# Altium footprint library FootPrintLib_3.PcbLib: 198 footprints (part 5 of 13)
Each footprint in its own frame and in the unit in brackets; x right, y up, seen from the top. Pads: shape width x height; smd on the part's side, far side on the other; paste and mask are expansions set on the pad; w line width, h text height; cw(c..) or ccw(c..) is an arc to the next point about the centre after c.
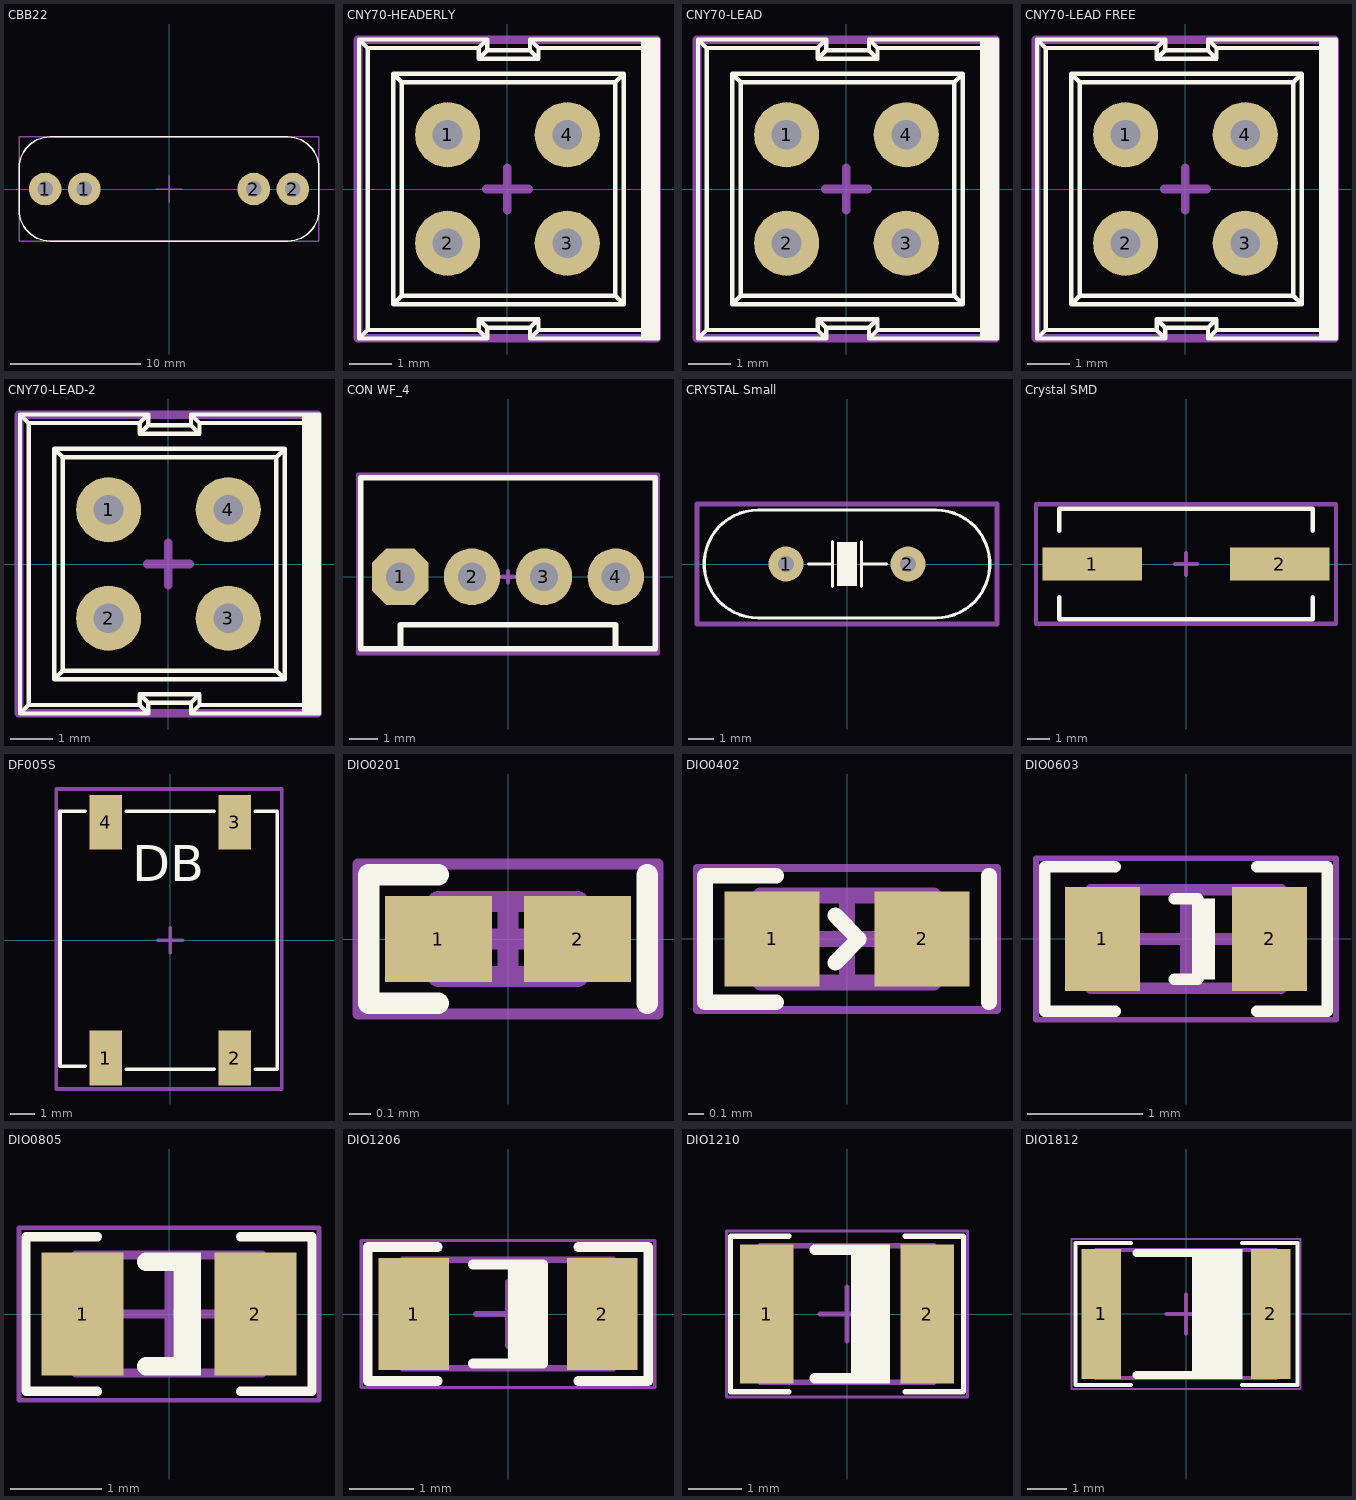
[diagram p4: the footprints below, top view; thin cyan lines are the x and y axes]

## CBB22 [mm] "Buddy: 23'mm, Pin: 19'mm, 16'mm, 13'mm,"
height 13
pads (4):
  round 2.5 hole 1.2: 1(-9.5,0) 1(-6.5,0) 2(6.5,0) 2(9.5,0)
Top Overlay:
  lines w0.1: -11.5,-1.587 ccw(c-9.087,-1.587) -9.087,-4 9.087,-4 ccw(c9.087,-1.587) 11.5,-1.587 11.5,0 11.5,1.587 ccw(c9.087,1.587) 9.087,4 0,4 -9.087,4 ccw(c-9.087,1.587) -11.5,1.587 -11.5,0 -11.5,-1.587
Mechanical 15:
  lines w0.1: -1,0 1,0 ; 0,-1 0,1 ; -11.5,-4 11.5,-4 11.5,4 -11.5,4 -11.5,-4
3D body "User Library-CBB81_W23_0_H14_5_T8_0_P19_0.STEP": height 19.5, standoff -8, extent -11.499,-4 11.5,4

## CNY70-HEADERLY [mm] "Dimensions (L x W x H in mm): 7 x 7 x 6  • Peak operating distance: < 0.5 mm DESIGNER ABBAS BASEREH"
height 6
pads (4):
  round 1.524 hole 0.7: 1(-1.4,1.27) 2(-1.4,-1.27) 3(1.4,-1.27) 4(1.4,1.27)
Top Overlay:
  rectangle: 3.125,-3.5 3.525,3.5
  lines w0.1: -3.475,-3.5 -0.475,-3.5 ; -3.475,-3.5 -3.275,-3.3 ; -3.475,-3.5 -3.475,3.5 ; -3.475,3.5 -3.275,3.3 ; -3.475,3.5 -0.475,3.5 ; -3.275,-3.3 -0.675,-3.3 ; -3.275,-3.3 -3.275,3.3 ; -3.275,3.3 -0.675,3.3 ; -2.675,-2.7 -2.475,-2.5 ; -2.675,-2.7 -2.675,2.7 ; -2.675,-2.7 2.725,-2.7 ; -2.675,2.7 -2.475,2.5 ; -2.675,2.7 2.725,2.7 ; -2.475,-2.5 -2.475,2.5 ; -2.475,-2.5 2.525,-2.5 ; -2.475,2.5 2.525,2.5 ; -0.675,-3.3 -0.675,-3.05 ; -0.675,-3.3 -0.475,-3.5 ; -0.675,-3.05 0.725,-3.05 ; -0.675,-3.05 -0.475,-3.25 ; -0.675,3.05 0.725,3.05 ; -0.675,3.05 -0.675,3.3 ; -0.675,3.05 -0.475,3.25 ; -0.675,3.3 -0.475,3.5 ; -0.475,-3.5 -0.475,-3.25 ; -0.475,-3.25 0.525,-3.25 ; -0.475,3.25 0.525,3.25 ; -0.475,3.25 -0.475,3.5 ; 0.525,-3.5 3.525,-3.5 ; 0.525,-3.5 0.725,-3.3 ; 0.525,-3.5 0.525,-3.25 ; 0.525,-3.25 0.725,-3.05 ; 0.525,3.25 0.725,3.05 ; 0.525,3.25 0.525,3.5 ; 0.525,3.5 0.725,3.3 ; 0.525,3.5 3.525,3.5 ; 0.725,-3.3 3.325,-3.3 ; 0.725,-3.3 0.725,-3.05 ; 0.725,3.05 0.725,3.3 ; 0.725,3.3 3.325,3.3 ; 2.525,-2.5 2.725,-2.7 ; 2.525,-2.5 2.525,2.5 ; 2.525,2.5 2.725,2.7 ; 2.725,-2.7 2.725,2.7 ; 3.325,-3.3 3.525,-3.5 ; 3.325,-3.3 3.325,3.3 ; 3.325,3.3 3.525,3.5 ; 3.525,-3.5 3.525,3.5
Mechanical 15:
  lines w0.2: -0.5,0 0.5,0 ; 0,-0.5 0,0.5 ; -3.5,-3.5 -3.5,3.5 3.5,3.5 3.5,-3.5 -3.5,-3.5
3D body "User Library-cny70-2.STEP": height 11.5, standoff -2.5, extent -3.55,-3.5 3.45,3.5

## CNY70-LEAD [mm] "Dimensions (L x W x H in mm): 7 x 7 x 6  • Peak operating distance: < 0.5 mm DESIGNER ABBAS BASEREH"
height 6
pads (4):
  round 1.524 hole 0.7: 1(-1.4,1.27) 2(-1.4,-1.27) 3(1.4,-1.27) 4(1.4,1.27)
Top Overlay:
  rectangle: 3.125,-3.5 3.525,3.5
  lines w0.1: -3.475,-3.5 -3.475,3.5 ; -3.475,-3.5 -3.275,-3.3 ; -3.475,-3.5 -0.475,-3.5 ; -3.475,3.5 -0.475,3.5 ; -3.475,3.5 -3.275,3.3 ; -3.275,-3.3 -3.275,3.3 ; -3.275,-3.3 -0.675,-3.3 ; -3.275,3.3 -0.675,3.3 ; -2.675,-2.7 2.725,-2.7 ; -2.675,-2.7 -2.675,2.7 ; -2.675,-2.7 -2.475,-2.5 ; -2.675,2.7 2.725,2.7 ; -2.675,2.7 -2.475,2.5 ; -2.475,-2.5 2.525,-2.5 ; -2.475,-2.5 -2.475,2.5 ; -2.475,2.5 2.525,2.5 ; -0.675,-3.3 -0.475,-3.5 ; -0.675,-3.3 -0.675,-3.05 ; -0.675,-3.05 -0.475,-3.25 ; -0.675,-3.05 0.725,-3.05 ; -0.675,3.05 -0.475,3.25 ; -0.675,3.05 -0.675,3.3 ; -0.675,3.05 0.725,3.05 ; -0.675,3.3 -0.475,3.5 ; -0.475,-3.5 -0.475,-3.25 ; -0.475,-3.25 0.525,-3.25 ; -0.475,3.25 -0.475,3.5 ; -0.475,3.25 0.525,3.25 ; 0.525,-3.5 0.525,-3.25 ; 0.525,-3.5 0.725,-3.3 ; 0.525,-3.5 3.525,-3.5 ; 0.525,-3.25 0.725,-3.05 ; 0.525,3.25 0.525,3.5 ; 0.525,3.25 0.725,3.05 ; 0.525,3.5 3.525,3.5 ; 0.525,3.5 0.725,3.3 ; 0.725,-3.3 0.725,-3.05 ; 0.725,-3.3 3.325,-3.3 ; 0.725,3.05 0.725,3.3 ; 0.725,3.3 3.325,3.3 ; 2.525,-2.5 2.525,2.5 ; 2.525,-2.5 2.725,-2.7 ; 2.525,2.5 2.725,2.7 ; 2.725,-2.7 2.725,2.7 ; 3.325,-3.3 3.325,3.3 ; 3.325,-3.3 3.525,-3.5 ; 3.325,3.3 3.525,3.5 ; 3.525,-3.5 3.525,3.5
Mechanical 15:
  lines w0.2: -0.5,0 0.5,0 ; 0,-0.5 0,0.5 ; -3.5,-3.5 3.5,-3.5 3.5,3.5 -3.5,3.5 -3.5,-3.5
3D body "SW3dPS-cny70-1.STEP": height 6.5, standoff -5.25, extent -3.5,-3.5 3.5,3.5

## CNY70-LEAD FREE [mm] "Dimensions (L x W x H in mm): 7 x 7 x 6  • Peak operating distance: < 0.5 mm DESIGNER ABBAS BASEREH"
height 6
pads (4):
  round 1.524 hole 0.7: 1(-1.4,1.27) 2(-1.4,-1.27) 3(1.4,-1.27) 4(1.4,1.27)
Top Overlay:
  rectangle: 3.125,-3.5 3.525,3.5
  lines w0.1: -3.475,-3.5 -3.475,3.5 ; -3.475,-3.5 -3.275,-3.3 ; -3.475,-3.5 -0.475,-3.5 ; -3.475,3.5 -0.475,3.5 ; -3.475,3.5 -3.275,3.3 ; -3.275,-3.3 -3.275,3.3 ; -3.275,-3.3 -0.675,-3.3 ; -3.275,3.3 -0.675,3.3 ; -2.675,-2.7 2.725,-2.7 ; -2.675,-2.7 -2.675,2.7 ; -2.675,-2.7 -2.475,-2.5 ; -2.675,2.7 2.725,2.7 ; -2.675,2.7 -2.475,2.5 ; -2.475,-2.5 2.525,-2.5 ; -2.475,-2.5 -2.475,2.5 ; -2.475,2.5 2.525,2.5 ; -0.675,-3.3 -0.475,-3.5 ; -0.675,-3.3 -0.675,-3.05 ; -0.675,-3.05 -0.475,-3.25 ; -0.675,-3.05 0.725,-3.05 ; -0.675,3.05 -0.475,3.25 ; -0.675,3.05 -0.675,3.3 ; -0.675,3.05 0.725,3.05 ; -0.675,3.3 -0.475,3.5 ; -0.475,-3.5 -0.475,-3.25 ; -0.475,-3.25 0.525,-3.25 ; -0.475,3.25 -0.475,3.5 ; -0.475,3.25 0.525,3.25 ; 0.525,-3.5 0.525,-3.25 ; 0.525,-3.5 0.725,-3.3 ; 0.525,-3.5 3.525,-3.5 ; 0.525,-3.25 0.725,-3.05 ; 0.525,3.25 0.525,3.5 ; 0.525,3.25 0.725,3.05 ; 0.525,3.5 3.525,3.5 ; 0.525,3.5 0.725,3.3 ; 0.725,-3.3 0.725,-3.05 ; 0.725,-3.3 3.325,-3.3 ; 0.725,3.05 0.725,3.3 ; 0.725,3.3 3.325,3.3 ; 2.525,-2.5 2.525,2.5 ; 2.525,-2.5 2.725,-2.7 ; 2.525,2.5 2.725,2.7 ; 2.725,-2.7 2.725,2.7 ; 3.325,-3.3 3.325,3.3 ; 3.325,-3.3 3.525,-3.5 ; 3.325,3.3 3.525,3.5 ; 3.525,-3.5 3.525,3.5
Mechanical 15:
  lines w0.2: -0.5,0 0.5,0 ; 0,-0.5 0,0.5 ; -3.5,-3.5 3.5,-3.5 3.5,3.5 -3.5,3.5 -3.5,-3.5
3D body "CNY70.STEP": height 6.01, standoff 0.01, extent -3.475,-3.5 3.525,3.5

## CNY70-LEAD-2 [mm] "Dimensions (L x W x H in mm): 7 x 7 x 6  • Peak operating distance: < 0.5 mm DESIGNER ABBAS BASEREH"
height 6
pads (4):
  round 1.524 hole 0.7: 1(-1.4,1.27) 2(-1.4,-1.27) 3(1.4,-1.27) 4(1.4,1.27)
Top Overlay:
  rectangle: 3.125,-3.5 3.525,3.5
  lines w0.1: -3.475,-3.5 -3.475,3.5 ; -3.475,-3.5 -3.275,-3.3 ; -3.475,-3.5 -0.475,-3.5 ; -3.475,3.5 -0.475,3.5 ; -3.475,3.5 -3.275,3.3 ; -3.275,-3.3 -3.275,3.3 ; -3.275,-3.3 -0.675,-3.3 ; -3.275,3.3 -0.675,3.3 ; -2.675,-2.7 2.725,-2.7 ; -2.675,-2.7 -2.675,2.7 ; -2.675,-2.7 -2.475,-2.5 ; -2.675,2.7 2.725,2.7 ; -2.675,2.7 -2.475,2.5 ; -2.475,-2.5 2.525,-2.5 ; -2.475,-2.5 -2.475,2.5 ; -2.475,2.5 2.525,2.5 ; -0.675,-3.3 -0.475,-3.5 ; -0.675,-3.3 -0.675,-3.05 ; -0.675,-3.05 -0.475,-3.25 ; -0.675,-3.05 0.725,-3.05 ; -0.675,3.05 -0.475,3.25 ; -0.675,3.05 -0.675,3.3 ; -0.675,3.05 0.725,3.05 ; -0.675,3.3 -0.475,3.5 ; -0.475,-3.5 -0.475,-3.25 ; -0.475,-3.25 0.525,-3.25 ; -0.475,3.25 -0.475,3.5 ; -0.475,3.25 0.525,3.25 ; 0.525,-3.5 0.525,-3.25 ; 0.525,-3.5 0.725,-3.3 ; 0.525,-3.5 3.525,-3.5 ; 0.525,-3.25 0.725,-3.05 ; 0.525,3.25 0.525,3.5 ; 0.525,3.25 0.725,3.05 ; 0.525,3.5 3.525,3.5 ; 0.525,3.5 0.725,3.3 ; 0.725,-3.3 0.725,-3.05 ; 0.725,-3.3 3.325,-3.3 ; 0.725,3.05 0.725,3.3 ; 0.725,3.3 3.325,3.3 ; 2.525,-2.5 2.525,2.5 ; 2.525,-2.5 2.725,-2.7 ; 2.525,2.5 2.725,2.7 ; 2.725,-2.7 2.725,2.7 ; 3.325,-3.3 3.325,3.3 ; 3.325,-3.3 3.525,-3.5 ; 3.325,3.3 3.525,3.5 ; 3.525,-3.5 3.525,3.5
Mechanical 15:
  lines w0.2: -0.5,0 0.5,0 ; 0,-0.5 0,0.5 ; -3.5,-3.5 3.5,-3.5 3.5,3.5 -3.5,3.5 -3.5,-3.5
3D body "CNY70.SLDPRT": height 6, standoff -6.75, extent -3.15,-3.15 3.15,3.15

## CON WF_4 [mm] "DS1070  WF, Cvilux CI31 pitch 2.54mm-Designer Abbas Basereh"
pads (4):
  oct 2x2 hole 1: 1(-3.81,0)
  round 2 hole 1: 2(-1.27,0) 3(1.27,0) 4(3.81,0)
Top Overlay:
  lines w0.2: -3.8,-2.548 -3.8,-1.7 3.8,-1.7 3.8,-2.548 ; -5.2,-2.548 5.2,-2.548 5.2,3.5 -5.2,3.5 -5.2,-2.548
Mechanical 15:
  lines w0.15: -0.2,0 0.2,0 ; 0,-0.2 0,0.2 ; -5.3,-2.7 5.3,-2.7 5.3,3.6 -5.3,3.6 -5.3,-2.7
3D body "User Library-CI31_4.step": height 11.56, standoff -3.24, extent -5.08,-2.402 5.08,3.398

## CRYSTAL Small [mil] "DESIGNER ABBAS BASEREH"
height 157.48
pads (2):
  round 55 hole 25: 1(-96.06,0) 2(96.06,0)
Top Overlay:
  rectangle: -15.75,-35 15.75,35
  lines w5: -60.87,0 -22.87,0 ; -22.87,-35 -22.87,35 ; 22.87,-35 22.87,35 ; 22.87,0 61.87,0 ; -140,-85 cw(c-140,0) -140,85 140,85 cw(c140,0) 140,-85 -140,-85
Mechanical 15:
  lines w7.87: -7.87,0 7.87,0 ; 0,-7.87 0,7.87 ; -236.22,-94.49 236.22,-94.49 236.22,94.49 -236.22,94.49 -236.22,-94.49
3D body "Crystal-3.8mm.STEP": height 142.13, standoff -76.77, extent -226.37,-88.58 226.38,88.59

## Crystal SMD [mm] "DESIGNER ABBAS BASEREH"
height 4
pads (2):
  rect 4.5x1.5 smd: 1(-4.25,0) 2(4.25,0)
Top Overlay:
  lines w0.2: -5.75,-1.5 -5.75,-2.5 5.75,-2.5 5.75,-1.5 ; -5.75,1.5 -5.75,2.5 5.75,2.5 5.75,1.5
Mechanical 15:
  lines w0.2: -0.5,0 0.5,0 ; 0,-0.5 0,0.5 ; -6.8,-2.7 -6.8,2.7 6.8,2.7 6.8,-2.7 -6.8,-2.7
3D body "User Library-HC49_SMD.STEP": height 5.18, standoff 0, extent -6.209,-2.25 6.091,2.25

## DF005S [mm] "MINIATURE GLASS PASSIVATED SINGLE-PHASE SURFACE MOUNT  BRIDGE RECTIFIER-Design:Abbas Basereh"
height 3.3
pads (4):
  rect 1.3x2.2 smd: 1(-2.6,-4.75) 2(2.6,-4.75) 3(2.6,4.75) 4(-2.6,4.75)
Top Overlay:
  lines w0.15: -3.429,-5.08 -4.445,-5.08 -4.445,5.207 -3.429,5.207 ; -1.778,-5.207 1.778,-5.207 ; -1.778,5.207 1.778,5.207 ; 3.429,-5.207 4.318,-5.207 4.318,5.207 3.429,5.207
  text "DB" at -1.524,1.905 h2.5
Mechanical 15:
  lines w0.15: -0.5,0 0.5,0 ; 0,-0.5 0,0.5 ; -4.6,-6 -4.6,6.1 4.5,6.1 4.5,-6 -4.6,-6
3D body "User Library-DFXXS.STEP": height 3.58, standoff 0.01, extent -4.315,-5.099 4.195,5.201

## DIO0201 [mm] "Chip Diode, 2-Leads, Body 0/60x0/30mm, IPC Medium Density DESIGNER:ABBAS BASEREH"
height 0.23
pads (2):
  rect 0.5x0.4 smd mask+0.04: 1(-0.325,0) 2(0.325,0)
Top Overlay:
  lines w0.1: -0.325,-0.3 -0.65,-0.3 -0.65,0.3 -0.325,0.3 ; 0.65,-0.3 0.65,0.3
Mechanical 13:
  lines w0.1: -0.325,-0.175 -0.325,0.175 0.325,0.175 0.325,-0.175 -0.325,-0.175
Mechanical 15:
  lines w0.05: -0.7,-0.35 -0.7,0.35 0.7,0.35 0.7,-0.35 -0.7,-0.35
  lines w0.1: -0.175,0 0.175,0 ; 0,-0.175 0,0.175
3D body "DIO0201.step": height 0.23, standoff 0, extent -0.325,-0.175 0.325,0.175

## DIO0402 [mm] "Chip Diode, 2-Leads, Body 1/00x0/50mm, IPC Medium Density DESIGNER:ABBAS BASEREH"
height 0.32
pads (2):
  rect 0.6x0.6 smd mask+0.06: 1(-0.475,0) 2(0.475,0)
Top Overlay:
  lines w0.1: -0.45,-0.4 -0.9,-0.4 -0.9,0.4 -0.45,0.4 ; -0.075,-0.15 0.075,0 -0.075,0.15 ; 0.9,-0.4 0.9,0.4
Mechanical 13:
  lines w0.1: -0.55,-0.275 0.55,-0.275 0.55,0.275 -0.55,0.275 -0.55,-0.275
Mechanical 15:
  lines w0.05: -0.95,-0.45 0.95,-0.45 0.95,0.45 -0.95,0.45 -0.95,-0.45
  lines w0.1: -0.275,0 0.275,0 ; 0,-0.275 0,0.275
3D body "DIO0402.step": height 0.32, standoff 0, extent -0.55,-0.275 0.55,0.275

## DIO0603 [mm] "Chip Diode, 2-Leads, Body 1/60x0/80mm, IPC Medium Density DESIGNER:ABBAS BASEREH"
height 0.4
pads (2):
  rect 0.65x0.9 smd: 1(-0.725,0) 2(0.725,0)
Top Overlay:
  rectangle: 0.05,-0.35 0.25,0.35
  lines w0.1: -0.612,-0.625 -1.225,-0.625 -1.225,0.625 -0.612,0.625 ; -0.1,-0.35 0.1,-0.35 ; -0.1,0.35 0.1,0.35 ; 0.612,-0.625 1.225,-0.625 1.225,0.625 0.612,0.625
Mechanical 13:
  lines w0.1: -0.825,-0.425 -0.825,0.425 0.825,0.425 0.825,-0.425 -0.825,-0.425
Mechanical 15:
  lines w0.05: -1.3,-0.7 -1.3,0.7 1.3,0.7 1.3,-0.7 -1.3,-0.7
  lines w0.1: -0.425,0 0.425,0 ; 0,-0.425 0,0.425
3D body "DIO0603.step": height 0.4, standoff 0, extent -0.825,-0.425 0.825,0.425

## DIO0805 [mm] "Chip Diode, 2-Leads, Body 2/00x1/25mm, IPC Medium Density DESIGNER:ABBAS BASEREH"
height 0.5
pads (2):
  rect 0.9x1.35 smd: 1(-0.95,0) 2(0.95,0)
Top Overlay:
  rectangle: 0.05,-0.675 0.35,0.675
  lines w0.1: -0.788,-0.85 -1.575,-0.85 -1.575,0.85 -0.788,0.85 ; 0.788,-0.85 1.575,-0.85 1.575,0.85 0.788,0.85
  lines w0.2: -0.25,-0.575 0.1,-0.575 ; -0.25,0.575 0.1,0.575
Mechanical 13:
  lines w0.1: -1.025,-0.65 -1.025,0.65 1.025,0.65 1.025,-0.65 -1.025,-0.65
Mechanical 15:
  lines w0.05: -1.65,-0.95 -1.65,0.95 1.65,0.95 1.65,-0.95 -1.65,-0.95
  lines w0.1: -0.5,0 0.5,0 ; 0,-0.5 0,0.5
3D body "DIO0805.step": height 0.5, standoff 0, extent -1.025,-0.65 1.025,0.65

## DIO1206 [mm] "Chip Diode, 2-Leads, Body 3/20x1/60mm, IPC Medium Density DESIGNER:ABBAS BASEREH"
height 0.94
pads (2):
  rect 1.1x1.75 smd: 1(-1.475,0) 2(1.475,0)
Top Overlay:
  rectangle: 0,-0.8 0.625,0.775
  lines w0.15: -1.1,-1.05 -2.2,-1.05 -2.2,1.05 -1.1,1.05 ; -0.55,-0.775 0.55,-0.775 ; -0.55,0.775 0.55,0.775 ; 1.1,-1.05 2.2,-1.05 2.2,1.05 1.1,1.05
Mechanical 13:
  lines w0.1: -1.65,-0.85 1.65,-0.85 1.65,0.85 -1.65,0.85 -1.65,-0.85
Mechanical 15:
  lines w0.05: -2.3,-1.15 2.3,-1.15 2.3,1.15 -2.3,1.15 -2.3,-1.15
  lines w0.1: -0.5,0 0.5,0 ; 0,-0.5 0,0.5
3D body "DIO1206.step": height 0.94, standoff 0, extent -1.65,-0.85 1.65,0.85

## DIO1210 [mm] "Chip Diode, 2-Leads, Body 3/20x2/50mm, IPC Medium Density DESIGNER:ABBAS BASEREH"
height 0.55
pads (2):
  rect 1x2.6 smd: 1(-1.5,0) 2(1.5,0)
Top Overlay:
  rectangle: 0.075,-1.3 0.8,1.3
  lines w0.1: -1.088,-1.45 -2.175,-1.45 -2.175,1.45 -1.088,1.45 ; 1.088,-1.45 2.175,-1.45 2.175,1.45 1.088,1.45
  lines w0.2: -0.6,-1.2 0.6,-1.2 ; -0.6,1.2 0.6,1.2
Mechanical 13:
  lines w0.1: -1.625,-1.275 1.625,-1.275 1.625,1.275 -1.625,1.275 -1.625,-1.275
Mechanical 15:
  lines w0.05: -2.25,-1.55 2.25,-1.55 2.25,1.55 -2.25,1.55 -2.25,-1.55
  lines w0.1: -0.5,0 0.5,0 ; 0,-0.5 0,0.5
3D body "DIO1210.step": height 0.55, standoff 0, extent -1.625,-1.275 1.625,1.275

## DIO1812 [mm] "Chip Diode, 2-Leads, Body 4/50x3/20mm, IPC Medium Density DESIGNER:ABBAS BASEREH"
height 0.55
pads (2):
  rect 1x3.3 smd: 1(-2.15,0) 2(2.15,0)
Top Overlay:
  rectangle: 0.15,-1.65 1.425,1.65
  lines w0.1: -1.394,-1.8 -2.8,-1.8 -2.8,1.8 -1.394,1.8 ; 1.419,-1.8 2.825,-1.8 2.825,1.8 1.419,1.8
  lines w0.2: -1.25,-1.55 1.25,-1.55 ; -1.25,1.55 1.25,1.55
Mechanical 13:
  lines w0.1: -2.275,-1.625 -2.275,1.625 2.275,1.625 2.275,-1.625 -2.275,-1.625
Mechanical 15:
  lines w0.05: -2.9,-1.9 -2.9,1.9 2.9,1.9 2.9,-1.9 -2.9,-1.9
  lines w0.1: -0.5,0 0.5,0 ; 0,-0.5 0,0.5
3D body "DIO1812.step": height 0.55, standoff 0, extent -2.275,-1.625 2.275,1.625